# Altium schematic symbol library GRM188R71A105KA61D.SchLib: 1 symbol
Pins are listed as number, name and electrical type; pins without a type are passive.

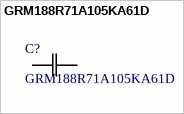
[diagram p0: symbol GRM188R71A105KA61D]

## GRM188R71A105KA61D
designator C?
Description; Manufacturer_Name: Murata; Copyright: Copyright (C) 2025 Ultra Librarian. All rights reserved.; Manufacturer_Part_Number: GRM188R71A105KA61D
footprint G-188_MUR
pins: 1, 2